# Altium footprint library type t relay footprint.PcbLib: 1 footprints
Each footprint in its own frame and in the unit in brackets; x right, y up, seen from the top. Pads: shape width x height; smd on the part's side, far side on the other; paste and mask are expansions set on the pad; w line width, h text height; cw(c..) or ccw(c..) is an arc to the next point about the centre after c.
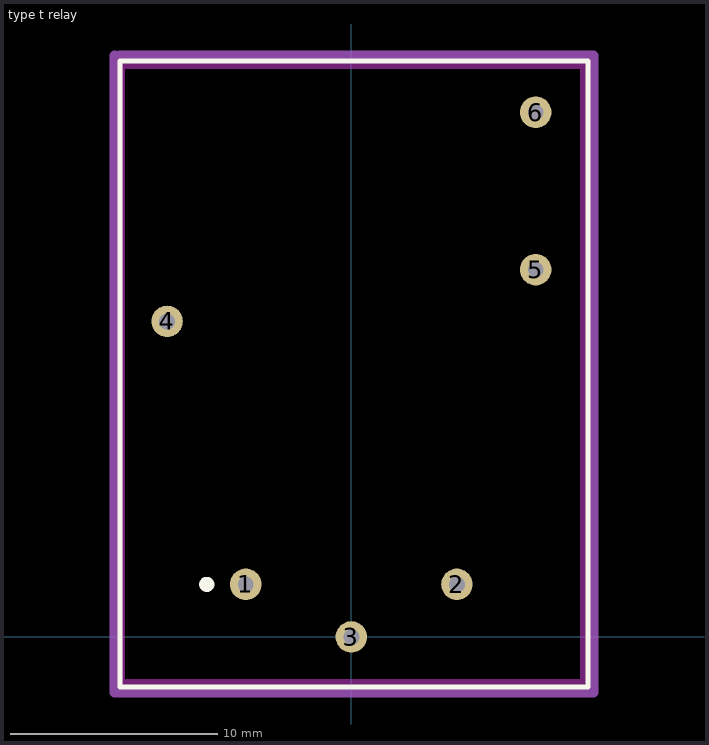
[diagram p0: the footprint, top view; thin cyan lines are the x and y axes]

## type t relay [mil]
pads (6):
  round 60 hole 30: 1(-200.79,100) 2(200.79,100) 3(0,0) 4(-350.39,600) 5(350.39,698.43) 6(350.39,997.64)
Top Overlay:
  circle w10: c-275,100 r9.45
  region: -280,105 -270,105 -270,95 -280,95
  lines w10: -440,-95 450,-95 450,1095 -440,1095 -440,-95
Keep-Out Layer:
  lines w10: -435,-85 440,-85 440,1085 -435,1085 -435,-85
Mechanical layer:
  lines w19.68: -450,1105 -450,-105 460,-105 460,1100 460,1105 -440,1105
Top Courtyard:
  lines w9.45: -440,1090 -440,-95 ; -440,-95 450,-95 ; -440,-95 -440,1060 -440,1095 ; -440,-95 450,-95 ; -440,1095 450,1095 ; -440,1095 450,1095 ; 450,-95 450,1095 ; 450,-95 450,1095